# Altium schematic symbol library Centralize.SchLib: 1081 symbols (part 21 of 26)
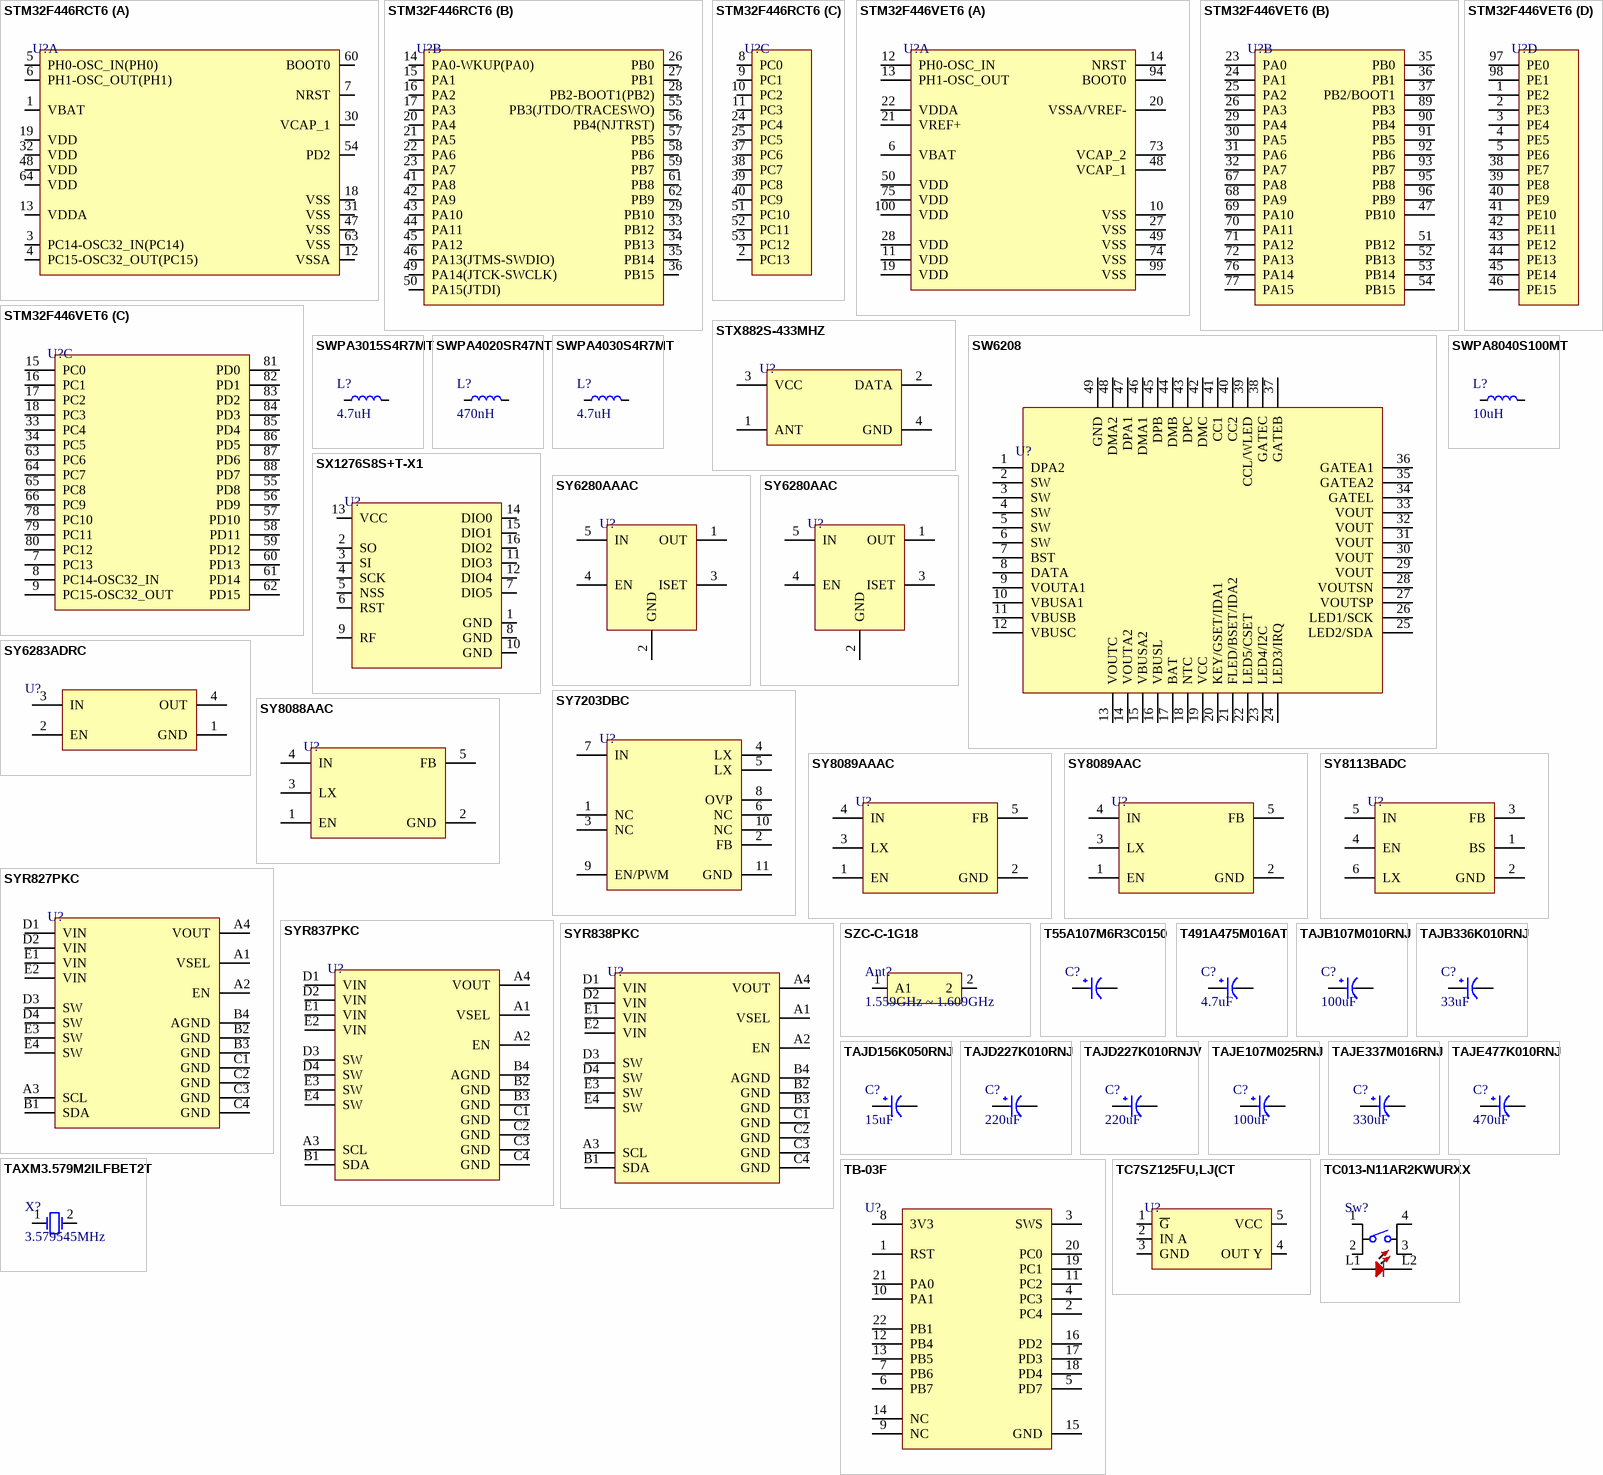
[diagram p67: symbols STM32F446RCT6 to TC013-N11AR2KWURXX]

## TAJD156K050RNJ
designator C?, comment 15uF
CAP TANT 15UF 10% 50V 2917; Manufacturer: Kyocera AVX; Manufacturer Part Number: TAJD156K050RNJ; Dielectric Material: Tantalum; ESR (Equivalent Series Resistance): 600mR; Leakage Current: 7.5uA; Dissipation Factor: 6%; Item Type: Capacitor; Supplier 1: Rs; RoHS: Yes; Category: Tantalum Capacitors; Stock 1: 712; Pricing 1: 500=1.59 (GBP); Mounting Technology: Surface Mount; Case/Package: 2917; Case Code (Metric): 7343; Case Code (Imperial): 2917; Min Operating Temperature: -55°C; Max Operating Temperature: 125°C; Value: 15uF; Tolerance: 10%; Voltage Rating: 50V; Packaging: Tape and Reel; Package Quantity: 500; Termination: SMD/SMT; Features: General Purpose; Series: TAJ; Construction: Flat; Length: 7.3mm; Width: 4.3mm; Height: 3.1mm; Height - Seated (Max): 0.122inch; Depth: 4.3mm; Lead Pitch: 4.4mm; Radiation Hardening: No; Reach SVHC Compliant: No; Lead Free: Lead Free; RoHS Compliant: Yes; ComponentLink1URL: https://datasheet.ciiva.com/7914/1680476-7914621.pdf?src-supplier=Element14; ComponentLink1Description: https://datasheet.ciiva.com/7914/1680476-7914621.pdf?src-supplier=Element14; ComponentLink2URL: https://datasheet.ciiva.com/7914/1680476-7914620.pdf?src-supplier=Element14; ComponentLink2Description: https://datasheet.ciiva.com/7914/1680476-7914620.pdf?src-supplier=Element14; ComponentLink3URL: https://datasheet.ciiva.com/7914/1826076-7914622.pdf?src-supplier=Element14; ComponentLink3Description: https://datasheet.ciiva.com/7914/1826076-7914622.pdf?src-supplier=Element14; ComponentLink4URL: https://datasheet.ciiva.com/29500/taj-29500328.pdf?src-supplier=Digi-Key; ComponentLink4Description: https://datasheet.ciiva.com/29500/taj-29500328.pdf?src-supplier=Digi-Key; ComponentLink5URL: https://datasheet.ciiva.com/29500/taj-29500327.pdf?src-supplier=Digi-Key; ComponentLink5Description: https://datasheet.ciiva.com/29500/taj-29500327.pdf?src-supplier=Digi-Key; ComponentLink6URL: https://datasheet.ciiva.com/29500/taj-29500329.pdf?src-supplier=Digi-Key; ComponentLink6Description: https://datasheet.ciiva.com/29500/taj-29500329.pdf?src-supplier=Digi-Key; ComponentLink7URL: https://datasheet.ciiva.com/12884/taj-27497-12884462.pdf?src-supplier=Mouser; ComponentLink7Description: https://datasheet.ciiva.com/12884/taj-27497-12884462.pdf?src-supplier=Mouser; ComponentLink8URL: https://datasheet.ciiva.com/11229/taj-11229647.pdf?src-supplier=Avnet; ComponentLink8Description: https://datasheet.ciiva.com/11229/taj-11229647.pdf?src-supplier=Avnet; ComponentLink9URL: https://datasheet.ciiva.com/16492/taj-16492939.pdf?src-supplier=Future+Electronics; ComponentLink9Description: https://datasheet.ciiva.com/16492/taj-16492939.pdf?src-supplier=Future+Electronics; Supplier Part Number 1: 1360323; LCSC Part Number: C308932
footprint Case-D
pins: 1, 2

## TAJD227K010RNJ
designator C?, comment 220uF
CAP TANT 220UF 10% 10V 2917; Manufacturer: Kyocera AVX; Manufacturer Part Number: TAJD227K010RNJ; Item Type: Capacitor; Supplier: Rs; Supplier Part Number: 1349925; RoHS: Yes; Category: Tantalum Capacitors; Stock: 100; Pricing: 500=0.553, 2500=0.537, 5000=0.523 (GBP); ComponentLink1URL: https://datasheet.ciiva.com/11793/0900766b80ccdc61-11793083.pdf?src-supplier=Rs; ComponentLink1Description: https://datasheet.ciiva.com/11793/0900766b80ccdc61-11793083.pdf?src-supplier=Rs; ComponentLink2URL: https://datasheet.ciiva.com/3004/taj-3004530.pdf?src-supplier=Avnet; ComponentLink2Description: https://datasheet.ciiva.com/3004/taj-3004530.pdf?src-supplier=Avnet; ComponentLink3URL: https://datasheet.ciiva.com/3004/taj-3004531.pdf?src-supplier=Avnet; ComponentLink3Description: https://datasheet.ciiva.com/3004/taj-3004531.pdf?src-supplier=Avnet; ComponentLink4URL: https://datasheet.ciiva.com/264/taj-264391.pdf?src-supplier=Digi-Key; ComponentLink4Description: https://datasheet.ciiva.com/264/taj-264391.pdf?src-supplier=Digi-Key; ComponentLink5URL: https://datasheet.ciiva.com/264/taj-264392.pdf?src-supplier=Digi-Key; ComponentLink5Description: https://datasheet.ciiva.com/264/taj-264392.pdf?src-supplier=Digi-Key; ComponentLink6URL: https://datasheet.ciiva.com/264/taj-264393.pdf?src-supplier=Digi-Key; ComponentLink6Description: https://datasheet.ciiva.com/264/taj-264393.pdf?src-supplier=Digi-Key; ComponentLink7URL: https://datasheet.ciiva.com/15163/getdatasheetpartid-121064-15163429.pdf?src-supplier=Verical; ComponentLink7Description: https://datasheet.ciiva.com/15163/getdatasheetpartid-121064-15163429.pdf?src-supplier=Verical; ComponentLink8URL: https://datasheet.ciiva.com/16201/taj-16201535.pdf?src-supplier=Future+Electronics; ComponentLink8Description: https://datasheet.ciiva.com/16201/taj-16201535.pdf?src-supplier=Future+Electronics; LCSC Part Number: C8024
footprint Case-D
pins: 1, 2

## TAJD227K010RNJV
designator C?, comment 220uF
CAP TANT 220UF 10% 10V 2917; Manufacturer: Kyocera AVX; Manufacturer Part Number: TAJD227K010RNJV; ESR (Equivalent Series Resistance): 500mR; Leakage Current: 22uA; Polarity: Polar; Dissipation Factor: 8%; Item Type: Capacitor; Supplier: Mouser; Supplier Part Number: 581-TAJD227K010RNJV; RoHS: Yes; Category: Tantalum Capacitors; Stock: 2881; Pricing: 1=1.15, 10=1.04, 50=1.04, 100=1.04, 1000=0.451, 10000=0.395 (USD); Case/Package: Molded; Case Code (Imperial): 2917; Case Code (Metric): 7343; Min Operating Temperature: -55°C; Max Operating Temperature: 125°C; Package Quantity: 500; Packaging: Tape and Reel; Series: TAJ; Voltage Rating: 10V; Tolerance: 10%; Value: 220uF; Termination: SMD/SMT; Voltage Rating (DC): 10V; Construction: Flat; Length: 7.3mm; Width: 4.3mm; Height: 3.1mm; Depth: 4.3mm; Radiation Hardening: No; RoHS Compliant: Yes; Lead Free: Lead Free; ComponentLink1URL: https://datasheet.ciiva.com/12887/taj-27497-12887958.pdf?src-supplier=Mouser; ComponentLink1Description: https://datasheet.ciiva.com/12887/taj-27497-12887958.pdf?src-supplier=Mouser; ComponentLink2URL: https://datasheet.ciiva.com/11229/taj-11229592.pdf?src-supplier=Avnet; ComponentLink2Description: https://datasheet.ciiva.com/11229/taj-11229592.pdf?src-supplier=Avnet; LCSC Part Number: C8024
footprint Case-D
pins: 1, 2

## TAJE107M025RNJ
designator C?, comment 100uF
CAP TANT 100UF 20% 25V 2917; Manufacturer: Kyocera AVX; Manufacturer Part Number: TAJE107M025RNJ; ESR (Equivalent Series Resistance): 300mR; Leakage Current: 25uA; Polarity: Polar; Dissipation Factor: 10%; Supplier 1: Mouser; RoHS: Yes; Category: Tantalum Capacitors; Stock 1: 109; Pricing 1: 1=2.81000, 10=2.81000, 50=2.81000, 100=2.19000, 1000=1.76000, 10000=1.76000 (USD); Mount: Surface Mount; Case/Package: 2917; Number of Pins: 2; Case Code (Imperial): 2917; Case Code (Metric): 7343; Min Operating Temperature: -55°C; Max Operating Temperature: 125°C; Capacitance: 100uF; Tolerance: 20%; Packaging: Tape and Reel; Voltage Rating: 25V; Voltage Rating (DC): 25V; Features: General Purpose; Package Quantity: 1; Termination: SMD/SMT; Series: TAJ; Construction: Flat; Length: 7.3mm; Width: 4.3mm; Height: 4.3mm; Depth: 4.3mm; Height - Seated (Max): 0.169inch; Radiation Hardening: No; Lead Free: Lead Free; RoHS Compliant: Yes; REACH SVHC: No SVHC; ComponentLink1URL: https://datasheet.ciiva.com/26787/taje107m025rnj-26787048.pdf?src-supplier=IIIC; ComponentLink1Description: https://datasheet.ciiva.com/26787/taje107m025rnj-26787048.pdf?src-supplier=IIIC; ComponentLink2URL: https://datasheet.ciiva.com/265/taj-265541.pdf?src-supplier=Digi-Key; ComponentLink2Description: https://datasheet.ciiva.com/265/taj-265541.pdf?src-supplier=Digi-Key; ComponentLink3URL: https://datasheet.ciiva.com/265/taj-265542.pdf?src-supplier=Digi-Key; ComponentLink3Description: https://datasheet.ciiva.com/265/taj-265542.pdf?src-supplier=Digi-Key; ComponentLink4URL: https://datasheet.ciiva.com/265/taj-265540.pdf?src-supplier=Digi-Key; ComponentLink4Description: https://datasheet.ciiva.com/265/taj-265540.pdf?src-supplier=Digi-Key; ComponentLink5URL: https://datasheet.ciiva.com/28609/1719052-28609254.pdf?src-supplier=Element14; ComponentLink5Description: https://datasheet.ciiva.com/28609/1719052-28609254.pdf?src-supplier=Element14; ComponentLink6URL: https://datasheet.ciiva.com/11230/taj-11230456.pdf?src-supplier=Avnet; ComponentLink6Description: https://datasheet.ciiva.com/11230/taj-11230456.pdf?src-supplier=Avnet; ComponentLink7URL: https://datasheet.ciiva.com/17339/taj-17339677.pdf?src-supplier=Avnet+Europe; ComponentLink7Description: https://datasheet.ciiva.com/17339/taj-17339677.pdf?src-supplier=Avnet+Europe; ComponentLink8URL: https://datasheet.ciiva.com/22667/1719052-22667581.pdf?src-supplier=Element14; ComponentLink8Description: https://datasheet.ciiva.com/22667/1719052-22667581.pdf?src-supplier=Element14; Supplier Part Number 1: 581-TAJE107M025RNJ; LCSC Part Number: C7230
footprint Case-E
pins: 1, 2

## TAJE337M016RNJ
designator C?, comment 330uF
CAP TANT 330UF 20% 16V 2917; Manufacturer: Kyocera AVX; Manufacturer Part Number: TAJE337M016RNJ; ESR (Equivalent Series Resistance): 400mR; Leakage Current: 52.8uA; Dissipation Factor: 30%; Item Type: Capacitor; Supplier 1: Arrow Electronics; RoHS: Yes; Category: Tantalum Capacitors; Stock 1: 4000; Pricing 1: 400=1.8678, 2000=1.7998, 4000=1.7657, 6000=1.7481, 10000=1.7306, 30000=1.7133, 50000=1.6961 (USD); Mounting Technology: Surface Mount; Case/Package: 2917; Case Code (Imperial): 2917; Case Code (Metric): 7343; Min Operating Temperature: -55°C; Max Operating Temperature: 125°C; Voltage Rating: 16V; Tolerance: 20%; Packaging: Tape and Reel; Value: 330uF; Termination: SMD/SMT; Voltage Rating (DC): 16V; Series: TAJ; Features: General Purpose; Length: 7.3mm; Width: 4.3mm; Height: 4.3mm; Lead Free: Lead Free; RoHS Compliant: Yes; ComponentLink1URL: https://datasheet.ciiva.com/12882/taj-27497-12882412.pdf?src-supplier=Mouser; ComponentLink1Description: https://datasheet.ciiva.com/12882/taj-27497-12882412.pdf?src-supplier=Mouser; Supplier Part Number 1: TAJE337M016RNJ; LCSC Part Number: C51599
footprint Case-E
pins: 1, 2

## TAJE477K010RNJ
designator C?, comment 470uF
CAP TANT 470UF 10% 10V 2917; Manufacturer: Kyocera AVX; Manufacturer Part Number: TAJE477K010RNJ; Dielectric Material: Tantalum; ESR (Equivalent Series Resistance): 500mR; Leakage Current: 47uA; Polarity: Polar; Item Type: Capacitor; Supplier 1: Arrow Electronics; RoHS: Yes; Category: Tantalum Capacitors; Stock 1: 5; Pricing 1: 1=1.3181 (USD); Mounting Technology: Surface Mount,PCB; Case/Package: 2917; Pins: 2; Case Code (Imperial): 2917; Case Code (Metric): 7343; Min Operating Temperature: -55°C; Max Operating Temperature: 125°C; Value: 470uF; Tolerance: 10%; Packaging: Tape and Reel; Voltage Rating: 10V; Voltage Rating (DC): 10V; Package Quantity: 400; Termination: SMD/SMT; Voltage: 10V; Dissipation Factor: 10%; Features: General Purpose; Series: TAJ; Construction: Flat; Length: 7.3mm; Width: 4.3mm; Height: 4.1mm; Depth: 4.3mm; Lead Pitch: 4.4mm; Radiation Hardening: No; Reach SVHC Compliant: No; Lead Free: Lead Free; RoHS Compliant: Yes; ComponentLink1URL: https://datasheet.ciiva.com/7832/taj-7832508.pdf?src-supplier=Element14; ComponentLink1Description: https://datasheet.ciiva.com/7832/taj-7832508.pdf?src-supplier=Element14; ComponentLink2URL: https://datasheet.ciiva.com/7832/taj-7832507.pdf?src-supplier=Element14; ComponentLink2Description: https://datasheet.ciiva.com/7832/taj-7832507.pdf?src-supplier=Element14; ComponentLink3URL: https://datasheet.ciiva.com/265/taj-265547.pdf?src-supplier=Digi-Key; ComponentLink3Description: https://datasheet.ciiva.com/265/taj-265547.pdf?src-supplier=Digi-Key; ComponentLink4URL: https://datasheet.ciiva.com/265/taj-265546.pdf?src-supplier=Digi-Key; ComponentLink4Description: https://datasheet.ciiva.com/265/taj-265546.pdf?src-supplier=Digi-Key; ComponentLink5URL: https://datasheet.ciiva.com/265/taj-265548.pdf?src-supplier=Digi-Key; ComponentLink5Description: https://datasheet.ciiva.com/265/taj-265548.pdf?src-supplier=Digi-Key; ComponentLink6URL: https://datasheet.ciiva.com/12882/taj-27497-12882504.pdf?src-supplier=Mouser; ComponentLink6Description: https://datasheet.ciiva.com/12882/taj-27497-12882504.pdf?src-supplier=Mouser; ComponentLink7URL: https://datasheet.ciiva.com/14602/70001050-14602312.pdf?src-supplier=Allied+Electronics; ComponentLink7Description: https://datasheet.ciiva.com/14602/70001050-14602312.pdf?src-supplier=Allied+Electronics; ComponentLink8URL: https://datasheet.ciiva.com/14600/70001050-14600301.pdf?src-supplier=Allied+Electronics; ComponentLink8Description: https://datasheet.ciiva.com/14600/70001050-14600301.pdf?src-supplier=Allied+Electronics; ComponentLink9URL: https://datasheet.ciiva.com/11229/taj-11229470.pdf?src-supplier=Avnet; ComponentLink9Description: https://datasheet.ciiva.com/11229/taj-11229470.pdf?src-supplier=Avnet; ComponentLink10URL: https://datasheet.ciiva.com/16330/taj-16330918.pdf?src-supplier=Future+Electronics; ComponentLink10Description: https://datasheet.ciiva.com/16330/taj-16330918.pdf?src-supplier=Future+Electronics; Supplier Part Number 1: TAJE477K010RNJ; LCSC Part Number: C7234
footprint Case-E
pins: 1, 2

## TAXM3.579M2ILFBET2T
designator X?, comment 3.579545MHz
3.579545MHz 20pF ±30ppm HC-49S-SMD Crystals ROHS; Manufacturer: TAE; Manufacturer Part Number: TAXM3.579M2ILFBET2T; Package: HC-49S-SMD; LCSC Part Number: C362352; Item Type: Crystal; ComponentLink1Description: LCSC; ComponentLink1URL: https://www.lcsc.com/product-detail/Crystals_TAE-Zhejiang-Abel-Elec-TAXM3-579M2ILFBET2T_C362352.html
footprint HC-49S-SMD
pins: 1 OSC1, 2 OSC2

## TB-03F
designator U?
Bluetooth Modules RoHS; Manufacturer: Ai-Thinker; Brand Category: Authorized Brands; Category: IoT/Communication Modules/Bluetooth Modules; LCSC Part Number: C2764069; ComponentLink1Description: LCSC; ComponentLink1URL: https://www.lcsc.com/product-detail/Bluetooth-Modules_Ai-Thinker-TB-03F_C2764069.html
footprint TB-03F_ (Bluetooth Modules RoHS)
pins: 1 RST, 2 PC4, 3 SWS, 4 PC3, 5 PD7, 6 PB7, 7 PB6, 8 3V3, 9 NC, 10 PA1, 11 PC2, 12 PB4, 13 PB5, 14 NC, 15 GND, 16 PD2, 17 PD3, 18 PD4, 19 PC1, 20 PC0, 21 PA0, 22 PB1

## TC7SZ125FU,LJ(CT
designator U?
IC BUFFER NON-INVERT 5.5V USV; Manufacturer: Toshiba; Manufacturer Part Number: TC7SZ125FU,LJ(CT; Min Supply Voltage: 1.8V; Number of Elements: 1; Logic Function: Buffer,Inverting; High Level Output Current: 32mA; Operating Supply Current: 20uA; Max Power Dissipation: 200mW; Polarity: Non-Inverting; Output Type: 3-STATE; Supplier: Rs; Supplier Part Number: 8966769; RoHS: No; Category: Buffers, Drivers and Transceivers; Stock: 800; Pricing: 100=0.12, 300=0.097, 600=0.094, 1200=0.091, 3000=0.089 (GBP); Mounting Technology: Surface Mount; Case/Package: SSOP; Min Operating Temperature: -40°C; Max Operating Temperature: 85°C; Packaging: Tape and Reel; Package Quantity: 1; Max Supply Voltage: 5.5V; Series: TC7SZ; Number of Bits per Element: 1; Low Level Output Current: 32mA; RoHS Compliant: No; ComponentLink1URL: https://datasheet.ciiva.com/48465/tc7sz125fu-datasheet-en-20150723-48465175.pdf?src-supplier=Avnet; ComponentLink1Description: https://datasheet.ciiva.com/48465/tc7sz125fu-datasheet-en-20150723-48465175.pdf?src-supplier=Avnet; ComponentLink2URL: https://datasheet.ciiva.com/46637/dst-tc7sz125f-tde-en-7291-46637000.pdf?src-supplier=Digi-Key; ComponentLink2Description: https://datasheet.ciiva.com/46637/dst-tc7sz125f-tde-en-7291-46637000.pdf?src-supplier=Digi-Key; ComponentLink3URL: https://datasheet.ciiva.com/46637/dst-tc7sz125f-tde-en-7291-46637001.pdf?src-supplier=Digi-Key; ComponentLink3Description: https://datasheet.ciiva.com/46637/dst-tc7sz125f-tde-en-7291-46637001.pdf?src-supplier=Digi-Key; ComponentLink4URL: https://datasheet.ciiva.com/46636/dst-tc7sz125f-tde-en-7291-46636999.pdf?src-supplier=Digi-Key; ComponentLink4Description: https://datasheet.ciiva.com/46636/dst-tc7sz125f-tde-en-7291-46636999.pdf?src-supplier=Digi-Key
footprint SOT-323-5
pins: 1 ~{G}, 2 IN A, 3 GND, 4 OUT Y, 5 VCC

## TC013-N11AR2KWURXX
designator Sw?
Tactile Switches TACTILE/JOG SWITCH SPST50mA 12VDC180gf; Manufacturer: Well Buying; Manufacturer Part Number: TC013-N11AR2KWURXX; Supplier: Mouser; Supplier Part Number: 107-TC013-N11AR2KWUR; Stock: 200; Pricing: 1=2.91, 10=2.91, 50=2.42, 100=2.22, 1000=1.87, 10000=1.58 (USD); Item Type: Tactile Switch; ComponentLink1Description: Mouser; ComponentLink1URL: https://www.mouser.co.uk/ProductDetail/Well-Buying/TC013-N11AR2KWURXX?qs=vLWxofP3U2zrMQ1CZcNZrQ%3D%3D&_gl=1*g8ep1t*_ga*MTY0Nzg2ODA4Ni4xNjg5MjQ2Nzk3*_ga_15W4STQT4T*MTY4OTI0Njc5Ny4xLjEuMTY4OTI0NjgyMy4wLjAuMA..*_ga_1KQLCYKRX3*MTY4OTI0Njc5Ny4xLjEuMTY4OTI0NjgyMy4zNC4wLjA
footprint TC013-N11AR2KWURXX
pins: 1, 2, 3, 4, L1, L2

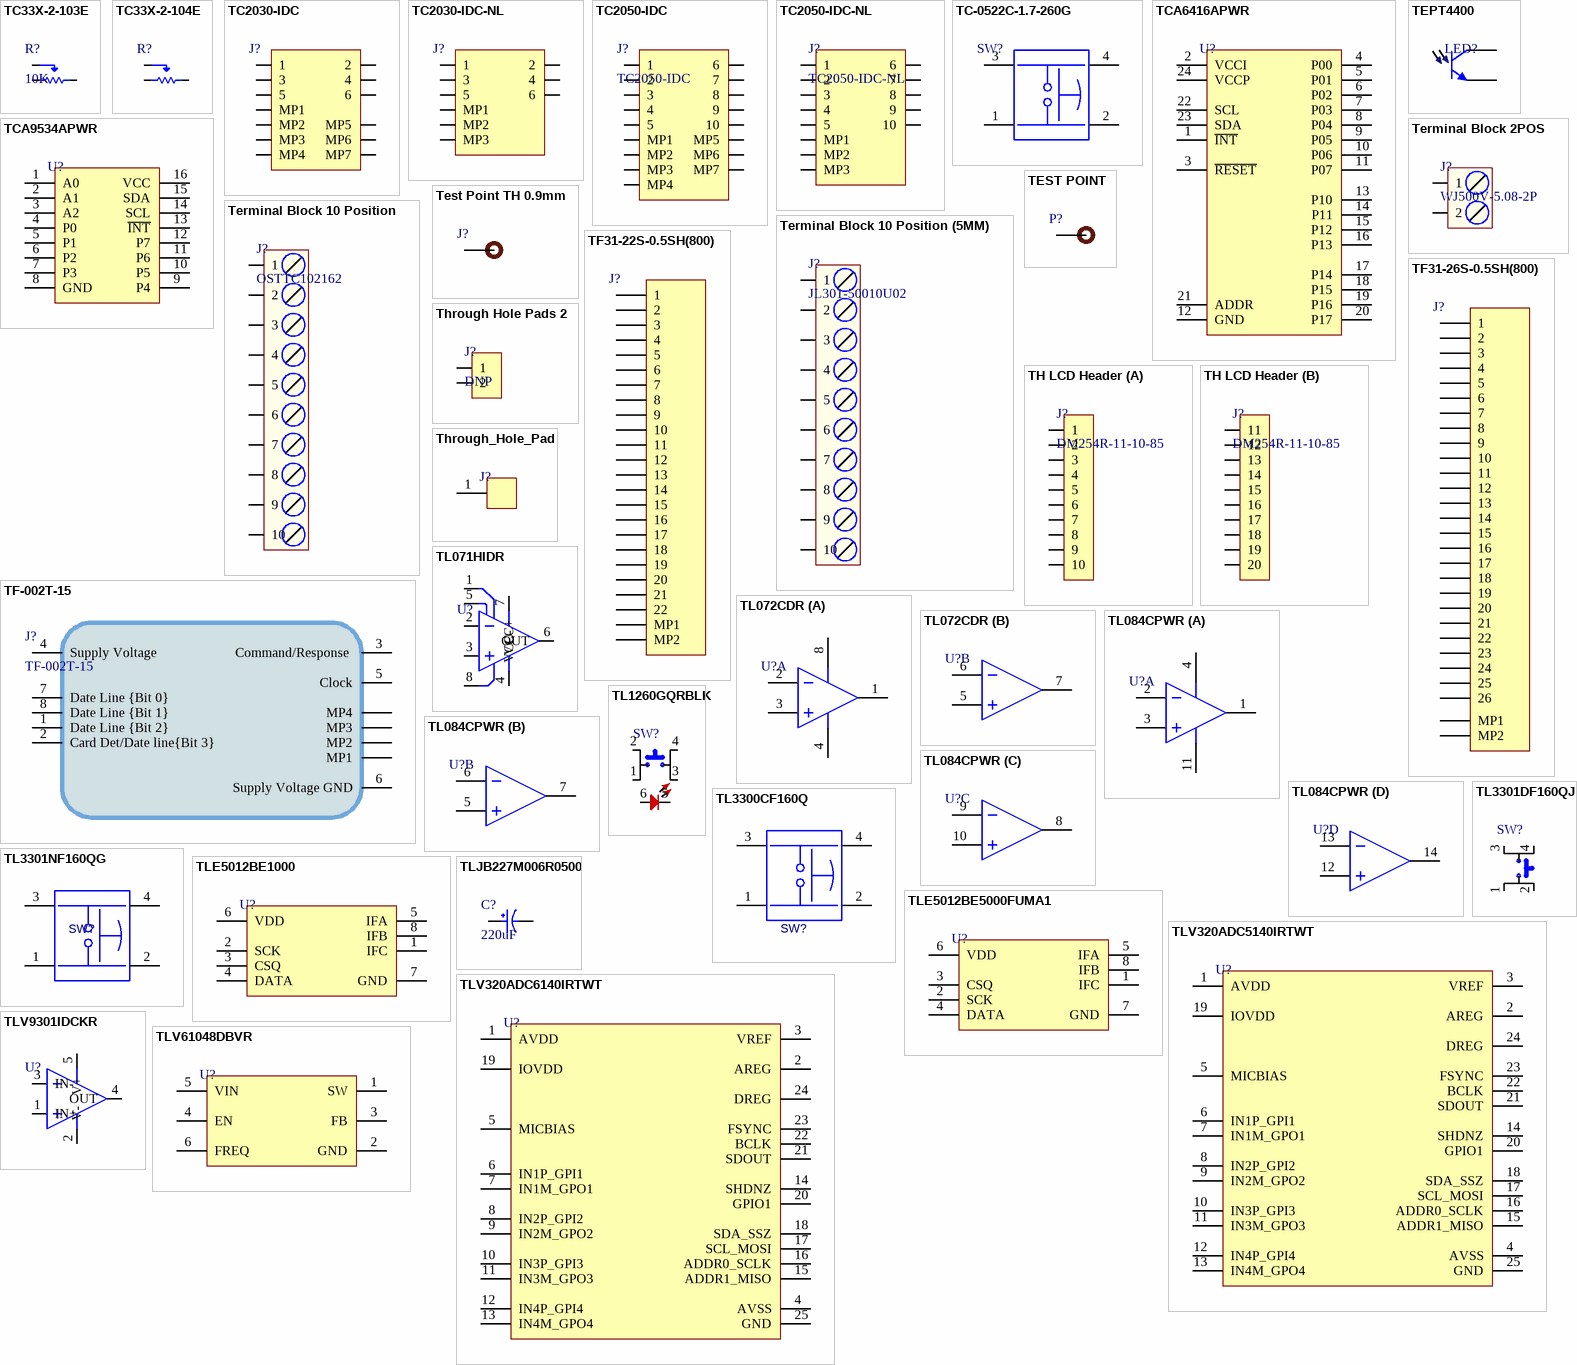
[diagram p41: symbols TC33X-2-103E to TLV61048DBVR]

## TC33X-2-103E
designator R?, comment 10K
TRIMMER 10K OHM 0.1W J LEAD TOP; Manufacturer: Bourns; Manufacturer Part Number: TC33X-2-103E; Tolerance: 25%; Resistance: 10kR; Number of Turns: 1; Power Rating: 100mW; Temperature Coefficient: 250ppm/°C; Voltage Rating (DC): 50V; Item Type: Potentiometer; Supplier 1: Rs; RoHS: Yes; Category: Variable Resistors and Potentiometers; Stock 1: 950; Pricing 1: 500=0.24400, 1000=0.22000, 2000=0.19700, 4000=0.17300 (GBP); Mount: Surface Mount; Color: Silver; Weight: 29.4mg; Contact Plating: Copper,Tin,Silver; Min Operating Temperature: -40°C; Max Operating Temperature: 100°C; Packaging: Tape and Reel; Package Quantity: 1; Resistor Type: Cermet; Termination: Foot Print; Taper: Linear; Max Power Dissipation: 100mW; Series: TC33; Resistance Tolerance: 25%; Length: 3mm; Width: 0.118inch; Height: 0.047inch; Depth: 3.8mm; Radiation Hardening: No; Reach SVHC Compliant: Yes; Military Standard: Not; Lead Free: Lead Free; RoHS Compliant: Yes; ComponentLink1URL: https://datasheet.ciiva.com/11830/0900766b802749b3-11830705.pdf?src-supplier=Rs; ComponentLink1Description: https://datasheet.ciiva.com/11830/0900766b802749b3-11830705.pdf?src-supplier=Rs; ComponentLink2URL: https://datasheet.ciiva.com/7953/1818686-7953349.pdf?src-supplier=Element14; ComponentLink2Description: https://datasheet.ciiva.com/7953/1818686-7953349.pdf?src-supplier=Element14; ComponentLink3URL: https://datasheet.ciiva.com/26944/getdatasheetpartid-183773-26944166.pdf?src-supplier=Verical; ComponentLink3Description: https://datasheet.ciiva.com/26944/getdatasheetpartid-183773-26944166.pdf?src-supplier=Verical; ComponentLink4URL: https://datasheet.ciiva.com/2155/tc33-2155962.pdf?src-supplier=Digi-Key; ComponentLink4Description: https://datasheet.ciiva.com/2155/tc33-2155962.pdf?src-supplier=Digi-Key; ComponentLink5URL: https://datasheet.ciiva.com/2155/tc33-2155963.pdf?src-supplier=Digi-Key; ComponentLink5Description: https://datasheet.ciiva.com/2155/tc33-2155963.pdf?src-supplier=Digi-Key; ComponentLink6URL: https://datasheet.ciiva.com/2155/tc33-2155964.pdf?src-supplier=Digi-Key; ComponentLink6Description: https://datasheet.ciiva.com/2155/tc33-2155964.pdf?src-supplier=Digi-Key; ComponentLink7URL: https://datasheet.ciiva.com/8089/tc33-8089484.pdf?src-supplier=Avnet; ComponentLink7Description: https://datasheet.ciiva.com/8089/tc33-8089484.pdf?src-supplier=Avnet; ComponentLink8URL: https://datasheet.ciiva.com/28659/1520225-28659212.pdf?src-supplier=Element14; ComponentLink8Description: https://datasheet.ciiva.com/28659/1520225-28659212.pdf?src-supplier=Element14; Supplier Part Number 1: 4617135P; LCSC part Number: C719176
footprint TC33X-2-103E_
pins: 1 CCW, 2 Wiper, 3 CW

## TC33X-2-104E
designator R?
TRIMMER 100K OHM 0.1W J LEAD TOP; Manufacturer: Bourns; Manufacturer Part Number: TC33X-2-104E; Resistance: 100kR; Tolerance: 25%; Power Rating: 100mW; Number of Turns: 1; Temperature Coefficient: 250ppm/°C; Voltage Rating (DC): 50V; Item Type: Potentiometer; Supplier 1: Arrow Electronics; RoHS: Yes; Category: Variable Resistors and Potentiometers; Stock 1: 12500; Pricing 1: 2500=0.15500, 5000=0.13130 (USD); Mount: Surface Mount; Color: Silver; Weight: 29.4mg; Min Operating Temperature: -40°C; Max Operating Temperature: 100°C; Packaging: Tape and Reel; Package Quantity: 2500; Resistor Type: Carbon,Cermet; Termination: Foot Print; Max Power Dissipation: 100mW; Series: TC33; Resistance Tolerance: 25%; Length: 3mm; Width: 0.118inch; Height: 0.047inch; Depth: 3.8mm; Radiation Hardening: No; REACH SVHC: No SVHC; Military Standard: Not; RoHS Compliant: Yes; ComponentLink1URL: https://datasheet.ciiva.com/11832/0900766b802749b3-11832506.pdf?src-supplier=RSComponents; ComponentLink1Description: https://datasheet.ciiva.com/11832/0900766b802749b3-11832506.pdf?src-supplier=RSComponents; ComponentLink2URL: https://datasheet.ciiva.com/8700/tc33-8700395.pdf?src-supplier=Avnet; ComponentLink2Description: https://datasheet.ciiva.com/8700/tc33-8700395.pdf?src-supplier=Avnet; ComponentLink3URL: https://datasheet.ciiva.com/2155/tc33-2155965.pdf?src-supplier=Digi-Key; ComponentLink3Description: https://datasheet.ciiva.com/2155/tc33-2155965.pdf?src-supplier=Digi-Key; ComponentLink4URL: https://datasheet.ciiva.com/7953/1818686-7953181.pdf?src-supplier=Element14; ComponentLink4Description: https://datasheet.ciiva.com/7953/1818686-7953181.pdf?src-supplier=Element14; ComponentLink5URL: https://datasheet.ciiva.com/16716/70155234-16716301.pdf?src-supplier=Allied+Electronics; ComponentLink5Description: https://datasheet.ciiva.com/16716/70155234-16716301.pdf?src-supplier=Allied+Electronics; ComponentLink6URL: https://datasheet.ciiva.com/2155/tc33-2155966.pdf?src-supplier=Digi-Key; ComponentLink6Description: https://datasheet.ciiva.com/2155/tc33-2155966.pdf?src-supplier=Digi-Key; ComponentLink7URL: https://datasheet.ciiva.com/7953/1818686-7953182.pdf?src-supplier=Element14; ComponentLink7Description: https://datasheet.ciiva.com/7953/1818686-7953182.pdf?src-supplier=Element14; ComponentLink8URL: https://datasheet.ciiva.com/2155/tc33-2155967.pdf?src-supplier=Digi-Key; ComponentLink8Description: https://datasheet.ciiva.com/2155/tc33-2155967.pdf?src-supplier=Digi-Key; Supplier Part Number 1: TC33X-2-104E; LCSC Part Number: C719186
footprint TC33X-2-104E_
pins: 1 CCW, 2 Wiper, 3 CW

## TC2030-IDC
designator J?
CABLE ADAPTER 6 POS; Manufacturer: Tag-Connect; Manufacturer Part Number: TC2030-IDC; ComponentLink1URL: http://www.tag-connect.com/Materials/TC2030-MCP%20Datasheet.pdf?src-supplier=Digi-Key; ComponentLink1Description: http://www.tag-connect.com/Materials/TC2030-MCP%20Datasheet.pdf?src-supplier=Digi-Key; Supplier 1: Digi-Key; Stock 1: 284; Pricing 1: 1=43.71 (USD); Package Quantity: 1; Supplier Part Number 1: TC2030-IDC-ND
footprint TC2030-IDC_ (CABLE ADAPTER 6 POS)
pins: 1, 2, 3, 4, 5, 6, MP1, MP2, MP3, MP4, MP5, MP6, MP7

## TC2030-IDC-NL
designator J?
footprint TC2030-IDC-NL_
pins: 1, 2, 3, 4, 5, 6, MP1, MP2, MP3

## TC2050-IDC
designator J?
CBL PLUG-OF-NAILS 10-PIN W/LEGS; Manufacturer: Tag-Connect; Supplier 1: Digi-Key; Manufacturer Part Number: TC2050-IDC; Stock 1: 59; Pricing 1: 1=40.17 (USD); Package Quantity: 1; ComponentLink1URL: http://www.tag-connect.com/Materials/TC2050-IDC%20Datasheet.pdf?src-supplier=Digi-Key; ComponentLink1Description: http://www.tag-connect.com/Materials/TC2050-IDC%20Datasheet.pdf?src-supplier=Digi-Key; Supplier Part Number 1: TC2050-IDC-ND
footprint TC2050-IDC_ (CBL PLUG-OF-NAILS 10-PIN W/LEGS)
pins: 1, 2, 3, 4, 5, 6, 7, 8, 9, 10, MP1, MP2, MP3, MP4, MP5, MP6, MP7

## TC2050-IDC-NL
designator J?
CBL PLUG-OF-NAILS 10-PIN; Manufacturer: Tag-Connect; Supplier 1: Digi-Key; Manufacturer Part Number: TC2050-IDC-NL; Stock 1: 544; Pricing 1: 1=40.17 (USD); Package Quantity: 1; ComponentLink1URL: http://www.tag-connect.com/Materials/TC2050-IDC-NL%20Datasheet.pdf?src-supplier=Digi-Key; ComponentLink1Description: http://www.tag-connect.com/Materials/TC2050-IDC-NL%20Datasheet.pdf?src-supplier=Digi-Key; Supplier Part Number 1: TC2050-IDC-NL-ND
footprint TC2050-IDC-NL_ (CBL PLUG-OF-NAILS 10-PIN)
pins: 1, 2, 3, 4, 5, 6, 7, 8, 9, 10, MP1, MP2, MP3

## TC-0522C-1.7-260G
designator SW?
No Gull Wing 50mA 100MΩ 80000 260gf@±50gf 12V -25℃~+85℃ 1.7mm Golden Round Button Brick nogging SPST SMD Tactile Switches ROHS; Manufacturer: HCTL; Manufacturer Part Number: TC-0522C-1.7-260G; Item Type: Switch; Value: -; Footprint: Custom; ComponentLink1Description: LCSC; ComponentLink1URL: https://www.lcsc.com/product-detail/Tactile-Switches_HCTL-TC-0522C-1-7-260G_C2845290.html; LCSC Part Number: C2845290
footprint TC-0522C-1.7-260G_
pins: 1, 2, 3, 4

## TCA6416APWR
designator U?
IC XPND 400KHZ I2C SMBUS 24TSSOP; Manufacturer: Texas Instruments; Manufacturer Part Number: TCA6416APWR; Min Supply Voltage: 1.65V; Max Supply Voltage: 5.5V; Number of Outputs: 16; Output Type: PUSH-PULL; Supplier 1: Mouser; RoHS: Yes; Category: Integrated Circuits (ICs); Stock 1: 21897; Pricing 1: 1=1.72, 10=1.54, 50=1.46, 100=1.24, 1000=0.846, 10000=0.769 (USD); Case/Package: TSSOP; Pins: 24; Weight: 0.003157oz; Min Operating Temperature: -40°C; Max Operating Temperature: 85°C; Packaging: Tape and Reel; Package Quantity: 2000; Number of I/Os: 16; Frequency: 400kHz; Clock Frequency: 400kHz; Series: -; Reach SVHC Compliant: No; Lead Free: Lead Free; RoHS Compliant: Yes; ComponentLink1URL: https://datasheet.ciiva.com/1505/1447033-1505146.pdf?src-supplier=Farnell; ComponentLink1Description: https://datasheet.ciiva.com/1505/1447033-1505146.pdf?src-supplier=Farnell; ComponentLink2URL: https://datasheet.ciiva.com/15134/getdatasheetpartid-321681-15134762.pdf?src-supplier=Verical; ComponentLink2Description: https://datasheet.ciiva.com/15134/getdatasheetpartid-321681-15134762.pdf?src-supplier=Verical; ComponentLink3URL: https://datasheet.ciiva.com/41460/001187860-da-01-en-ic-i-o-expander-tca6416apwr-tssop-24-tid-41460605.pdf?src-supplier=Conrad; ComponentLink3Description: https://datasheet.ciiva.com/41460/001187860-da-01-en-ic-i-o-expander-tca6416apwr-tssop-24-tid-41460605.pdf?src-supplier=Conrad; ComponentLink4URL: https://datasheet.ciiva.com/1496/1759802-1496150.pdf?src-supplier=Element14; ComponentLink4Description: https://datasheet.ciiva.com/1496/1759802-1496150.pdf?src-supplier=Element14; ComponentLink5URL: https://datasheet.ciiva.com/1495/1811244-1495996.pdf?src-supplier=Element14; ComponentLink5Description: https://datasheet.ciiva.com/1495/1811244-1495996.pdf?src-supplier=Element14; ComponentLink6URL: https://datasheet.ciiva.com/46411/1759802-46411468.pdf?src-supplier=Element14; ComponentLink6Description: https://datasheet.ciiva.com/46411/1759802-46411468.pdf?src-supplier=Element14; ComponentLink7URL: https://datasheet.ciiva.com/1780/tca6416a-1780361.pdf?src-supplier=Digi-Key; ComponentLink7Description: https://datasheet.ciiva.com/1780/tca6416a-1780361.pdf?src-supplier=Digi-Key; ComponentLink8URL: https://datasheet.ciiva.com/1780/tca6416a-1780360.pdf?src-supplier=Digi-Key; ComponentLink8Description: https://datasheet.ciiva.com/1780/tca6416a-1780360.pdf?src-supplier=Digi-Key; ComponentLink9URL: https://datasheet.ciiva.com/1780/tca6416a-1780362.pdf?src-supplier=Digi-Key; ComponentLink9Description: https://datasheet.ciiva.com/1780/tca6416a-1780362.pdf?src-supplier=Digi-Key; ComponentLink10URL: https://datasheet.ciiva.com/14195/tca6416a-14195366.pdf?src-supplier=Avnet; ComponentLink10Description: https://datasheet.ciiva.com/14195/tca6416a-14195366.pdf?src-supplier=Avnet; ComponentLink11URL: https://datasheet.ciiva.com/3149/tca6416a-3149515.pdf?src-supplier=Avnet; ComponentLink11Description: https://datasheet.ciiva.com/3149/tca6416a-3149515.pdf?src-supplier=Avnet; Supplier Part Number 1: 595-TCA6416APWR; LCSC Part Number: C130203; Item Type: IC
footprint 24-TSSOP_
pins: 1 ~{INT} "Interrupt output. Connect to VCCl or Vccp through a pullup resistor.", 2 VCCI "Supply voltage of I2C bus. Connect directly to the VCC of the external I2C master. Provides voltage leveltranslation", 3 ~{RESET} "Active-low reset input. Connect to VCCI through a pullup resistor, if no active connection is used.", 4 P00 "P-port input/output. (Push-pull design structure). At power-on, P00 is configured as an input.", 5 P01 "P-port input/output. (Push-pull design structure). At power-on, P01 is configured as an input.", 6 P02 "P-port input/output. (Push-pull design structure). At power-on, P02 is configured as an input.", 7 P03 "P-port input/output. (Push-pull design structure). At power-on, P03 is configured as an input.", 8 P04 "P-port input/output. (Push-pull design structure). At power-on, P04 is configured as an input.", 9 P05 "P-port input/output. (Push-pull design structure). At power-on, P05 is configured as an input.", 10 P06 "P-port input/output. (Push-pull design structure). At power-on, P06 is configured as an input.", 11 P07 "P-port input/output. (Push-pull design structure). At power-on, P07 is configured as an input.", 12 GND "Ground", 13 P10 "P-port input/output. (Push-pull design structure). At power-on, P10 is configured as an input.", 14 P11 "P-port input/output. (Push-pull design structure). At power-on, P11 is configured as an input.", 15 P12 "P-port input/output. (Push-pull design structure). At power-on, P12 is configured as an input.", 16 P13 "P-port input/output. (Push-pull design structure). At power-on, P13 is configured as an input.", 17 P14 "P-port input/output. (Push-pull design structure). At power-on, P14 is configured as an input.", 18 P15 "P-port input/output. (Push-pull design structure). At power-on, P15 is configured as an input.", 19 P16 "P-port input/output. (Push-pull design structure). At power-on, P16 is configured as an input.", 20 P17 "P-port input/output. (Push-pull design structure). At power-on, P17 is configured as an input.", 21 ADDR "Address input. Connect directly to VCCP or ground", 22 SCL "Serial clock bus. Connect to VCCI through a pullup resistor.", 23 SDA "Serial data bus. Connect to VCCI through a pullup resistor.", 24 VCCP "Supply voltage of TCA6416A for P port"

## TCA9534APWR
designator U?
IC XPNDR 400KHZ I2C 16TSSOP; Manufacturer: Texas Instruments; Manufacturer Part Number: TCA9534APWR; LCCS Part Number: C206010; Number of I/Os: 8; Supplier 1: Mouser; RoHS: Yes; Category: Interface ICs; Stock 1: 3387; Pricing 1: 1=1.58000, 10=1.42000, 50=1.35000, 100=1.11000, 1000=0.72400, 10000=0.70000 (USD); Mounting Technology: Surface Mount; Case/Package: TSSOP; Pins: 16; Contact Plating: Gold; Min Operating Temperature: -40°C; Max Operating Temperature: 85°C; Packaging: Tape and Reel; Interface: I2C; Frequency: 400kHz; Number of Outputs: 8; Lead Free: Lead Free; RoHS Compliant: Yes; ComponentLink1URL: http://www.ti.com/lit/ds/symlink/tca9534a.pdf?src-supplier=Digi-Key; ComponentLink1Description: http://www.ti.com/lit/ds/symlink/tca9534a.pdf?src-supplier=Digi-Key; ComponentLink2URL: http://www.ti.com/lit/pdf/sszc003?src-supplier=Digi-Key; ComponentLink2Description: http://www.ti.com/lit/pdf/sszc003?src-supplier=Digi-Key; ComponentLink3URL: http://www.ti.com/general/docs/lit/getliterature.tsp?genericPartNumber=TCA9534A&&fileType=pdf&src-supplier=Avnet; ComponentLink3Description: http://www.ti.com/general/docs/lit/getliterature.tsp?genericPartNumber=TCA9534A&&fileType=pdf&src-supplier=Avnet; Supplier Part Number 1: 595-TCA9534APWR; Item Type: IC
footprint 16-TSSOP (0.173", 4.40mm Width)
pins: 1 A0, 2 A1, 3 A2, 4 P0, 5 P1, 6 P2, 7 P3, 8 GND, 9 P4, 10 P5, 11 P6, 12 P7, 13 ~{INT}, 14 SCL, 15 SDA, 16 VCC

## TEPT4400
designator LED?
T-1 Ambient Light Sensors ROHS; Manufacturer: Vishay; Manufacturer Part Number: TEPT4400; Package: Custom; ComponentLink1Description: LCSC; ComponentLink1URL: https://lcsc.com/product-detail/Ambient-Light-Sensors_Vishay-Intertech-TEPT4400_C132178.html; LCSC Part Number: C132178
footprint TEPT4400_
pins: 1 E, 2 C

## Terminal Block 2POS
designator J?, comment WJ500V-5.08-2P
2.5 18A Green Straight pin 5.08mm 1 14~30 2 Straight,P=5.08mm; Manufacturer: Ningbo Kangnex Elec; Manufacturer Part Number: WJ500V-5.08-2P; LCSC Part Number: C8465; ComponentLink1Description: LCSC; ComponentLink1URL: https://www.lcsc.com/product-detail/Screw-span-style-background-color-ff0-terminal-span_Ningbo-Kangnex-Elec-WJ500V-5-08-2P_C8465.html
footprint Terminal Block 2P_ (TERMINAL BLOCK 2POS 5.08MM SIDE)
pins: 1, 2

## Terminal Block 10 Position
designator J?, comment OSTTC102162
TERM BLK 10P SIDE ENT 5.08MM PCB; Manufacturer: On-Shore Technology; Plating: Steel; Number of Levels: 1; Number of Positions Per Level: 10; Current: 15A; Voltage: 300V; Wire Gauge (Max): 22AWG; Wire Gauge (Min): 14AWG; Pitch: 0.2inch; Supplier 1: Digi-Key; Manufacturer Part Number: OSTTC102162; Stock 1: 5083; Pricing 1: 1=1.84, 10=1.39, 25=1.2884, 50=1.1582, 100=1.13, 250=0.98876, 500=0.904, 1000=0.81925, 5000=0.72038 (USD); Mount: Through Hole; Number of Pins: 10; Color: Blue; Contact Plating: Tin; Contact Material: Brass; Housing Color: Blue; Housing Material: Thermoplastic; Min Operating Temperature: -30°C; Max Operating Temperature: 105°C; Packaging: Bulk; Termination: Screw; Number of Positions: 10; Number of Rows: 1; Length: 50.8mm; Height: 10mm; Width: 7.6mm; Lead Free: Lead Free; Flammability Rating: UL94 V-0; ComponentLink1URL: http://www.on-shore.com/wp-content/uploads/2015/09/osttcxx2162.pdf?src-supplier=Digi-Key; ComponentLink1Description: http://www.on-shore.com/wp-content/uploads/2015/09/osttcxx2162.pdf?src-supplier=Digi-Key; Supplier Part Number 1: ED2616-ND
footprint Terminal Block 10 Position_ (TERM BLK 10P SIDE ENT 5.08MM PCB)
pins: 1, 2, 3, 4, 5, 6, 7, 8, 9, 10

## Terminal Block 10 Position (5MM)
designator J?, comment JL301-50010U02
15A 300V Blue Straight pin 5mm 10 Straight,P=5mm Screw terminal; Manufacturer: JILN; Manufacturer Part Number: JL301-50010U02; LCSC Part Number: C409141; ComponentLink1Description: LCSC; ComponentLink1URL: https://www.lcsc.com/product-detail/span-style-background-color-ff0-Screw-span-span-style-background-color-ff0-terminal-span_JILN-JL301-50010U02_C409141.html
footprint JL301-50010U02
pins: 1, 2, 3, 4, 5, 6, 7, 8, 9, 10

## TEST POINT
designator P?
Test Point ON; Item Type: TEST POINT
footprint Test-point
pins: 1

## Test Point TH 0.9mm
designator J?
------; Manufacturer Part Number: Test Point TH 0.9mm; Item Type: Test Point
footprint TP 0.9mm
pins: 1

## TF31-22S-0.5SH(800)
designator J?
CONN FFC 22POS 0.50MM SMD; Manufacturer: Hirose; Manufacturer Part Number: TF31-22S-0.5SH(800); Supplier 1: Digi-Key; RoHS: Yes; Stock 1: 14399; Pricing 1: 1=0.46000, 10=0.43100, 25=0.36920, 50=0.31360, 100=0.30140, 250=0.27060, 500=0.25830, 1000=0.21525 (USD); RoHS Compliant: No; Supplier Part Number 1: 26-TF31-22S-0.5SH(800)CT-ND
footprint TF31-22S-0.5SH(800)_ (CONN FFC 22POS 0.50MM SMD)
pins: 1, 2, 3, 4, 5, 6, 7, 8, 9, 10, 11, 12, 13, 14, 15, 16, 17, 18, 19, 20, 21, 22, MP1, MP2

## TF31-26S-0.5SH(800)
designator J?
FFC FPC Connectors Horizontal Mounting Angle Beige 0.5 mm - Pitch 26 Positions; Manufacturer: Hirose; Manufacturer Part Number: TF31-26S-0.5SH(800); Supplier 1: Digi-Key; RoHS: Yes; Category: FFC / FPC; Stock 1: 17190; Pricing 1: 1=2.08000, 10=1.88700, 25=1.77120, 50=1.69400, 100=1.61700, 250=1.46300, 500=1.34750, 1000=1.15500 (USD); RoHS Compliant: No; Supplier Part Number 1: 26-TF31-26S-0.5SH(800)CT-ND
footprint TF31-26S-0.5SH(800)_ (CONN FFC 26POS 0.50MM SMD)
pins: 1, 2, 3, 4, 5, 6, 7, 8, 9, 10, 11, 12, 13, 14, 15, 16, 17, 18, 19, 20, 21, 22, 23, 24, 25, 26, MP1, MP2

## TF-002T-15
designator J?
SD Card Connector SMD; Manufacturer: SOFNG; Card Type: MicroSD; Card Connection Mode: Pluggable; ComponentLink1Description: LCSC; ComponentLink1URL: https://lcsc.com/product-detail/SD-Card-Connectors_SOFNG-TF-002T-15_C125616.html
footprint TF-002T-15 (SMD SD Card Connectors ROHS)
pins: 1 Date Line {Bit 2}, 2 Card Det/Date line{Bit 3}, 3 Command/Response , 4 Supply Voltage (power), 5 Clock, 6 Supply Voltage GND (power), 7 Date Line {Bit 0}, 8 Date Line {Bit 1}, MP1, MP2, MP3, MP4

## TH LCD Header (A)
designator J?, comment DM254R-11-10-85
2.54mm Plugin 3A 10P Straight 1x10P 8.5mm Top Square Holes Plugin,P=2.54mm Female Headers ROHS; Manufacturer: DEALON; Manufacturer Part Number: DM254R-11-10-85; Package: Plugin,P=2.54mm; Item Type: Female Header; LCSC Part Number: C2935981; ComponentLink1Description: LCSC; ComponentLink1URL: https://www.lcsc.com/product-detail/span-style-background-color-ff0-Female-span-Headers_DEALON-DM254R-11-10-85_C2935981.html
footprint HDR 1x10(Female)
pins: 1, 2, 3, 4, 5, 6, 7, 8, 9, 10

## TH LCD Header (B)
designator J?, comment DM254R-11-10-85
2.54mm Plugin 3A 10P Straight 1x10P 8.5mm Top Square Holes Plugin,P=2.54mm Female Headers ROHS; Manufacturer: DEALON; Manufacturer Part Number: DM254R-11-10-85; Package: Plugin,P=2.54mm; Item Type: Female Header; LCSC Part Number: C2935981; ComponentLink1Description: LCSC; ComponentLink1URL: https://www.lcsc.com/product-detail/span-style-background-color-ff0-Female-span-Headers_DEALON-DM254R-11-10-85_C2935981.html
footprint HDR 1x10(Female) B
pins: 11, 12, 13, 14, 15, 16, 17, 18, 19, 20

## Through Hole Pads 2
designator J?, comment DNP
3.96mm Pitch Through Hole Pads 2; Item Type: Through Hole Pads; Manufacturer Part Number: Through Hole Pads 2
footprint Through Hole Pads 2
pins: 1, 2

## Through_Hole_Pad
designator J?
Wire Connecting Pad
footprint Through Hole Pad (High Power)_
pins: 1

## TL071HIDR
designator U?
IC OPAMP JFET 1 CIRCUIT 8SOIC; Manufacturer: Texas Instruments; Manufacturer Part Number: TL071HIDR; Supplier: Mouser; Supplier Part Number: 595-TL071HIDR; RoHS: No; Category: Amplifiers - Op Amps, Buffer, Instrumentation; Stock: 8676; Pricing: 1=0.41, 10=0.286, 50=0.286, 100=0.167, 1000=0.099, 10000=0.076 (USD); LCSC Part Number: C5214234; Item Type: IC
footprint SOIC-8
pins: 1 NC (power), 2 IN-, 3 IN+, 4 VCC- (power), 5 NC (power), 6 OUT, 7 VCC+ (power), 8 NC (power)

## TL072CDR
designator U?
J-FET Amplifier 2 Circuit  8-SOIC; Manufacturer: Texas Instruments; Manufacturer Part Number: TL072CDR; Operating Supply Voltage: 18V; Voltage Gain: 106.02dB; Unity Gain Bandwidth Product: 3MHz; Min Dual Supply Voltage: 3.5V; Nominal Supply Current: 5mA; Common Mode Rejection Ratio: 70dB; Number of Channels: 2; Slew Rate: 13V/µs; Max I/O Voltage: 10mV; Input Bias Current: 200pA; Operating Supply Current: 1.4mA; Dual Supply Voltage: 9V; Item Type: IC; Supplier 1: Arrow Electronics; RoHS: Yes; Category: Amplifiers - Op Amps, Buffer, Instrumentation; Stock 1: 1137; Pricing 1: 1=0.69620, 10=0.69390, 25=0.69170, 100=0.68940, 250=0.68720, 500=0.68490, 1000=0.68260 (USD); Case/Package: D; Number of Pins: 8; Contact Plating: Gold; Min Operating Temperature: -40°C; Max Operating Temperature: 85°C; Package Quantity: 2500; Packaging: Tape and Reel; Max Dual Supply Voltage: 18V; Bandwidth: 3MHz; Nominal Gain Bandwidth Product: 3MHz; Number of Circuits: 2; Gain Bandwidth Product: 3MHz; Input Offset Voltage (Vos): 10mV; Number of Elements: 2; Supply Current: 5mA; Technology: BIFET; Max Supply Voltage: 18V; Series: -; Number of Amplifiers: 2; Length: 4.9mm; Width: 3.91mm; Height: 1.58mm; Radiation Hardening: No; RoHS Compliant: Yes; Lead Free: Lead Free; Reach SVHC Compliant: Yes; ComponentLink1URL: https://datasheet.ciiva.com/1795/tl071a-1795600.pdf?src-supplier=Digi-Key; ComponentLink1Description: https://datasheet.ciiva.com/1795/tl071a-1795600.pdf?src-supplier=Digi-Key; ComponentLink2URL: https://datasheet.ciiva.com/46392/1882732-46392284.pdf?src-supplier=Element14; ComponentLink2Description: https://datasheet.ciiva.com/46392/1882732-46392284.pdf?src-supplier=Element14; ComponentLink3URL: https://datasheet.ciiva.com/1795/tl071a-1795599.pdf?src-supplier=Digi-Key; ComponentLink3Description: https://datasheet.ciiva.com/1795/tl071a-1795599.pdf?src-supplier=Digi-Key; ComponentLink4URL: https://datasheet.ciiva.com/1795/tl071a-1795598.pdf?src-supplier=Digi-Key; ComponentLink4Description: https://datasheet.ciiva.com/1795/tl071a-1795598.pdf?src-supplier=Digi-Key; ComponentLink5URL: https://datasheet.ciiva.com/7709/1862384-7709919.pdf?src-supplier=Element14; ComponentLink5Description: https://datasheet.ciiva.com/7709/1862384-7709919.pdf?src-supplier=Element14; ComponentLink6URL: https://datasheet.ciiva.com/2974/tl074-2974203.pdf?src-supplier=Avnet; ComponentLink6Description: https://datasheet.ciiva.com/2974/tl074-2974203.pdf?src-supplier=Avnet; Supplier Part Number 1: TL072CDR; LCSC Part Number: C67473
footprint SOIC-8
part A pins: 1 1OUT, 2 1IN-, 3 1IN+, 4 VCC- (power), 8 VCC+ (power)
part B pins: 5 2IN+, 6 2IN-, 7 2OUT

## TL084CPWR
designator U?
IC OPAMP JFET 4 CIRCUIT 14TSSOP; Manufacturer: Texas Instruments; Manufacturer Part Number: TL084CPWR; Nominal Supply Current: 11.2mA; Number of Channels: 4; Voltage Gain: 106.02dB; Max Dual Supply Voltage: 18V; Min Dual Supply Voltage: 3.5V; Unity Gain Bandwidth Product: 3MHz; Common Mode Rejection Ratio: 70dB; Slew Rate: 13V/µs; Max I/O Voltage: 15mV; Input Bias Current: 400pA; Operating Supply Current: 1.4mA; Min Supply Voltage: 7V; Quiescent Current: 2.8A; Max Power Dissipation: 680mW; Supplier 1: Mouser; RoHS: Yes; Category: Amplifiers - Op Amps, Buffer, Instrumentation; Stock 1: 3; Pricing 1: 1=0.64000, 10=0.54500, 50=0.54500, 100=0.37800, 500=0.32000, 1000=0.24700, 2000=0.22500, 10000=0.22500 (USD); Case/Package: TSSOP; Number of Pins: 14; Contact Plating: Gold; Min Operating Temperature: -40°C; Max Operating Temperature: 125°C; Packaging: Tape and Reel; Package Quantity: 1; Bandwidth: 3MHz; Nominal Gain Bandwidth Product: 3MHz; Number of Circuits: 4; Gain Bandwidth Product: 3MHz; Input Offset Voltage (Vos): 15mV; Number of Elements: 4; Max Supply Voltage: 18V; Number of Amplifiers: 4; Radiation Hardening: No; Lead Free: Lead Free; RoHS Compliant: Yes; REACH SVHC: No SVHC; ComponentLink1URL: https://datasheet.ciiva.com/34301/1064719-34301936.pdf?src-supplier=Jameco; ComponentLink1Description: https://datasheet.ciiva.com/34301/1064719-34301936.pdf?src-supplier=Jameco; ComponentLink2URL: https://datasheet.ciiva.com/1795/tl081a-1795644.pdf?src-supplier=Digi-Key; ComponentLink2Description: https://datasheet.ciiva.com/1795/tl081a-1795644.pdf?src-supplier=Digi-Key; ComponentLink3URL: https://datasheet.ciiva.com/1795/tl081a-1795643.pdf?src-supplier=Digi-Key; ComponentLink3Description: https://datasheet.ciiva.com/1795/tl081a-1795643.pdf?src-supplier=Digi-Key; ComponentLink4URL: https://datasheet.ciiva.com/1795/tl081a-1795645.pdf?src-supplier=Digi-Key; ComponentLink4Description: https://datasheet.ciiva.com/1795/tl081a-1795645.pdf?src-supplier=Digi-Key; ComponentLink5URL: https://datasheet.ciiva.com/14459/tl082-14459749.pdf?src-supplier=Avnet; ComponentLink5Description: https://datasheet.ciiva.com/14459/tl082-14459749.pdf?src-supplier=Avnet; ComponentLink6URL: https://datasheet.ciiva.com/48707/001072249-da-01-en-ic-opamp-jfet-3mh-tl084cpwr-tssop-14-tid-48707867.pdf?src-supplier=Conrad; ComponentLink6Description: https://datasheet.ciiva.com/48707/001072249-da-01-en-ic-opamp-jfet-3mh-tl084cpwr-tssop-14-tid-48707867.pdf?src-supplier=Conrad; Supplier Part Number 1: 595-TL084CPWR
footprint 14-TSSOP
part A pins: 1 1OUT, 2 IN-, 3 IN+, 4 VCC+ (power), 11 VCC- (power)
part B pins: 5 2IN+, 6 2IN-, 7 2OUT
part C pins: 8 3OUT, 9 3IN-, 10 3IN+
part D pins: 12 4IN+, 13 4IN-, 14 4OUT

## TL1260GQRBLK
designator SW?
SWITCH TACTILE SPST-NO 0.05A 12V; Manufacturer: E-Switch; Manufacturer Part Number: TL1260GQRBLK; Mechanical Life: 50000Cycles; Actuator Material: PBT,Polybutylene; Illumination Type: LED,Illuminated; Operating Force: 160gf; Throw Configuration: SPST; Switch Travel: 0.2mm; Switch Function: Off-Mom; Current Rating: 50mA; Illumination Color: Green; Item Type: Tactile Switch; Supplier 1: Digi-Key; RoHS: Yes; Category: Tactile Switches; Stock 1: 1154; Pricing 1: 1=3.53, 10=3.387, 25=3.0924, 100=2.6801, 250=2.42976, 500=2.25304, 1000=2.09106, 2500=1.89963, 5000=1.8225 (USD); Mounting Technology: Through Hole; Min Operating Temperature: -20°C; Max Operating Temperature: 70°C; Packaging: Bulk; Package Quantity: 1; Termination: PC Pin; Series: TL1260; Voltage Rating (DC): 12V; RoHS Compliant: Yes; Lead Free: Lead Free; ComponentLink1URL: https://datasheet.ciiva.com/2902/b200003h-2902974.pdf?src-supplier=Digi-Key; ComponentLink1Description: https://datasheet.ciiva.com/2902/b200003h-2902974.pdf?src-supplier=Digi-Key; Supplier Part Number 1: EG6023-ND
footprint TL1260GQRBLK
pins: 1, 2, 3, 4, 5 -, 6 +

## TL3300CF160Q
designator SW?
SWITCH TACTILE SPST-NO 0.05A 12V; Manufacturer: E-Switch; Manufacturer Part Number: TL3300CF160Q; Mechanical Life: 200000Cycles; Operating Force: 160gf; Current Rating: 50mA; Throw Configuration: SPST; Contact Resistance: 100mR; Illumination Type: Non-Illuminated; Switch Travel: 0.35mm; Switch Function: Off-Mom; Actuator Type: Standard; Actuator Length: 5mm; Supplier 1: Mouser; Stock 1: 1884; Pricing 1: 1=0.53, 10=0.513, 50=0.43, 100=0.393, 1000=0.293, 10000=0.274 (USD); Mount: Surface Mount; Case/Package: SMD/SMT; Contact Plating: Silver; Min Operating Temperature: -25°C; Max Operating Temperature: 70°C; Package Quantity: 1; Packaging: Tape and Reel; Voltage Rating (DC): 12V; Max Voltage Rating (DC): 12V; Termination: Gull Wing; Electrical Life: 200000Cycles; Orientation: Straight; Series: TL3300; Lead Free: Lead Free; RoHS Compliant: Yes; ComponentLink1URL: http://www.e-switch.com/system/asset/product_line/data_sheet/157/TL3300.pdf?src-supplier=Digi-Key; ComponentLink1Description: http://www.e-switch.com/system/asset/product_line/data_sheet/157/TL3300.pdf?src-supplier=Digi-Key; ComponentLink2URL: http://spec_sheets.e-switch.com/specs/N301102.pdf?src-supplier=Digi-Key; ComponentLink2Description: http://spec_sheets.e-switch.com/specs/N301102.pdf?src-supplier=Digi-Key; Supplier Part Number 1: 612-TL3300CF160Q; LCSC Part Number: C273516
footprint TL3300CF160Q. (SWITCH TACTILE SPST-NO 0.05A 12V)
pins: 1, 2, 3, 4

## TL3301DF160QJ
designator SW?
SWITCH TACTILE SPST-NO 0.05A 12V; Manufacturer: E-Switch; Manufacturer Part Number: TL3301DF160QJ; Item Type: Tactile Switch; Supplier: Digi-Key; Supplier Part Number: EG5464CT-ND; RoHS: Yes; Category: Tactile Switches; Stock: 3310; Pricing: 1=0.53, 10=0.515, 25=0.4964, 100=0.4295 (USD); ComponentLink1URL: https://datasheet.ciiva.com/16156/j100617-16156328.pdf?src-supplier=Onlinecomponents.com; ComponentLink1Description: https://datasheet.ciiva.com/16156/j100617-16156328.pdf?src-supplier=Onlinecomponents.com; ComponentLink2URL: https://datasheet.ciiva.com/16370/j100617-16370167.pdf?src-supplier=Future+Electronics; ComponentLink2Description: https://datasheet.ciiva.com/16370/j100617-16370167.pdf?src-supplier=Future+Electronics; ComponentLink3URL: https://datasheet.ciiva.com/2902/tl3301-2902785.pdf?src-supplier=Digi-Key; ComponentLink3Description: https://datasheet.ciiva.com/2902/tl3301-2902785.pdf?src-supplier=Digi-Key; LCSC Part Number: C273524
footprint TL3301DF160QJ
pins: 1, 2, 3, 4

## TL3301NF160QG
designator SW?, comment Tactile Switch  (value not drawn)
SWITCH TACTILE SPST-NO 0.05A 12V; Manufacturer: E-Switch; Manufacturer Part Number: TL3301NF160QG/TR; Value: Custom; Package: SMD (6.00mm x 6.00mm); LCSC Part Number: C273526; ComponentLink1Description: LCSC; ComponentLink1URL: https://www.lcsc.com/product-detail/Tactile-Switches_E-Switch-TL3301NF160QG_C273526.html
footprint TL3301NF160QG
pins: 1, 2, 3, 4

## TLE5012BE1000
designator U?
SENSOR ANGLE 360DEG SMD; Manufacturer: Infineon; Manufacturer Part Number: TLE5012BE1000; Interface: SPI; Supplier 1: RSComponents; RoHS: Yes; Category: Magnetic Sensors; Stock 1: 1; Pricing 1: 10=6.13600, 100=5.33500, 250=5.04900, 500=4.90100, 1000=4.77700 (USD); Case/Package: SOIC; Number of Pins: 8; Package Quantity: 2500; Packaging: Tape and Reel; RoHS Compliant: Yes; REACH SVHC: No SVHC; Supplier Part Number 1: 1702338; LCSC Part Number: C123083
footprint PG-DSO-8
pins: 1 IFC, 2 SCK, 3 CSQ, 4 DATA, 5 IFA, 6 VDD, 7 GND, 8 IFB

## TLE5012BE5000FUMA1
designator U?
MAGNETIC ANGLE SENSOR; Manufacturer: Infineon; Manufacturer Part Number: TLE5012BE5000; Interface: SPI,PWM; Item Type: IC; Supplier 1: RSComponents; RoHS: Yes; Category: Magnetic Sensors; Number of Pins: 8; Series: TLE5012; Package Quantity: 2500; Packaging: Tape and Reel; RoHS Compliant: Yes; ComponentLink1URL: http://www.mouser.com/ds/2/196/Infineon-TLE5012B_Exxxx-DS-v02_00-en-540142.pdf?src-supplier=Mouser; ComponentLink1Description: http://www.mouser.com/ds/2/196/Infineon-TLE5012B_Exxxx-DS-v02_00-en-540142.pdf?src-supplier=Mouser; Supplier Part Number 1: 2238590; LCSC Part Number: C3825286
footprint PG-DSO-8
pins: 1 IFC, 2 SCK, 3 CSQ, 4 DATA, 5 IFA, 6 VDD, 7 GND, 8 IFB